# Altium schematic symbol library Clema_RES.SchLib: 15 symbols
Pins are listed as number, name and electrical type; pins without a type are passive.

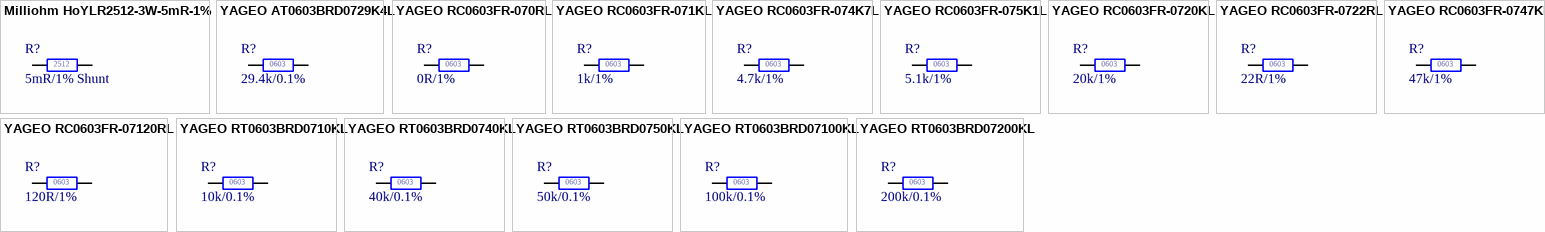
[diagram p0: symbols Milliohm HoYLR2512-3W-5mR-1% to YAGEO RT0603BRD07200KL]

## Milliohm HoYLR2512-3W-5mR-1%
designator R?, comment 5mR/1% Shunt
RES 5mΩ ±1% 3W 2512; Manufacturer: Milliohm; Manufacturer Part Number: HoYLR2512-3W-5mR-1%; DigiKey Part Number: 5705-HoYLR2512-3W-5mR-1%TR-ND; LCSC Part Number: C5375461; Package: 2512; Type: SMD
footprint RES_2512
pins: 1, 2

## YAGEO AT0603BRD0729K4L
designator R?, comment 29.4k/0.1%
RES 29.4kΩ ±0.1% 100mW 0603; Manufacturer: YAGEO; Manufacturer Part Number: AT0603BRD0729K4L; LCSC Part Number: C855768; Mouser Part Number: 603-AT0603BRD0729K4L; Package: 0603; Type: SMD
footprint RES_0603
pins: 1, 2

## YAGEO RC0603FR-070RL
designator R?, comment 0R/1%
RES 0Ω ±1% 100mW 0603; Manufacturer: YAGEO; Manufacturer Part Number: RC0603FR-070RL; DigiKey Part Number: 311-0.0HRTR-ND; LCSC Part Number: C100044; Mouser Part Number: 603-RC0603FR-070RL; Package: 0603; Type: SMD
footprint RES_0603
pins: 1, 2

## YAGEO RC0603FR-071KL
designator R?, comment 1k/1%
RES 1kΩ ±1% 100mW 0603; Manufacturer: YAGEO; Manufacturer Part Number: RC0603FR-071KL; DigiKey Part Number: 311-1.00KHRTR-ND; LCSC Part Number: C22548; Mouser Part Number: 603-RC0603FR-071KL; Package: 0603; Type: SMD
footprint RES_0603
pins: 1, 2

## YAGEO RC0603FR-074K7L
designator R?, comment 4.7k/1%
RES 4.7kΩ ±1% 100mW 0603; Manufacturer: YAGEO; Manufacturer Part Number: RC0603FR-074K7L; DigiKey Part Number: 311-4.70KHRTR-ND; LCSC Part Number: C99782; Mouser Part Number: 603-RC0603FR-074K7L; Package: 0603; Type: SMD
footprint RES_0603
pins: 1, 2

## YAGEO RC0603FR-075K1L
designator R?, comment 5.1k/1%
RES 5.1kΩ ±1% 100mW 0603; Manufacturer: YAGEO; Manufacturer Part Number: RC0603FR-075K1L; DigiKey Part Number: 311-5.10KHRTR-ND; LCSC Part Number: C105580; Mouser Part Number: 603-RC0603FR-075K1L; Package: 0603; Type: SMD
footprint RES_0603
pins: 1, 2

## YAGEO RC0603FR-0720KL
designator R?, comment 20k/1%
RES 20kΩ ±1% 100mW 0603; Manufacturer: YAGEO; Manufacturer Part Number: RC0603FR-0720KL; DigiKey Part Number: 311-20.0KHRTR-ND; LCSC Part Number: C105575; Mouser Part Number: 603-RC0603FR-0720KL; Package: 0603; Type: SMD
footprint RES_0603
pins: 1, 2

## YAGEO RC0603FR-0722RL
designator R?, comment 22R/1%
RES 22Ω ±1% 100mW 0603; Manufacturer: YAGEO; Manufacturer Part Number: RC0603FR-0722RL; LCSC Part Number: C107701; Mouser Part Number: 603-RC0603FR-0722RL; Package: 0603; Type: SMD
footprint RES_0603
pins: 1, 2

## YAGEO RC0603FR-0747KL
designator R?, comment 47k/1%
RES 47kΩ ±1% 100mW 0603; Manufacturer: YAGEO; Manufacturer Part Number: RC0603FR-0747KL; DigiKey Part Number: 311-47.0KHRTR-ND; LCSC Part Number: C105579; Mouser Part Number: 603-RC0603FR-0747KL; Package: 0603; Type: SMD
footprint RES_0603
pins: 1, 2

## YAGEO RC0603FR-07120RL
designator R?, comment 120R/1%
RES 120Ω ±1% 100mW 0603; Manufacturer: YAGEO; Manufacturer Part Number: RC0603FR-07120RL; LCSC Part Number: C114640; Mouser Part Number: 603-RC0603FR-07120RL; Package: 0603; Type: SMD
footprint RES_0603
pins: 1, 2

## YAGEO RT0603BRD0710KL
designator R?, comment 10k/0.1%
RES 10kΩ ±0.1% 100mW 0603; Manufacturer: YAGEO; Manufacturer Part Number: RT0603BRD0710KL; LCSC Part Number: C95204; Package: 0603; Type: SMD
footprint RES_0603
pins: 1, 2

## YAGEO RT0603BRD0740KL
designator R?, comment 40k/0.1%
RES 40kΩ ±0.1% 100mW 0603; Manufacturer: YAGEO; Manufacturer Part Number: RT0603BRD0740KL; DigiKey Part Number: 13-RT0603BRD0740KLTR-ND; LCSC Part Number: C861392; Package: 0603; Type: SMD
footprint RES_0603
pins: 1, 2

## YAGEO RT0603BRD0750KL
designator R?, comment 50k/0.1%
RES 50kΩ ±0.1% 100mW 0603; Manufacturer: YAGEO; Manufacturer Part Number: RT0603BRD0750KL; DigiKey Part Number: 13-RT0603BRD0750KLTR-ND; LCSC Part Number: C861451; Mouser Part Number: 603-RT0603BRD0750KL; Package: 0603; Type: SMD
footprint RES_0603
pins: 1, 2

## YAGEO RT0603BRD07100KL
designator R?, comment 100k/0.1%
RES 100kΩ ±0.1% 100mW 0603; Manufacturer: YAGEO; Manufacturer Part Number: RT0603BRD07100KL; DigiKey Part Number: YAG1235TR-ND; LCSC Part Number: C122538; Mouser Part Number: 603-RT0603BRD07100KL; Package: 0603; Type: SMD
footprint RES_0603
pins: 1, 2

## YAGEO RT0603BRD07200KL
designator R?, comment 200k/0.1%
RES 200kΩ ±0.1% 100mW 0603; Manufacturer: YAGEO; Manufacturer Part Number: RT0603BRD07200KL; LCSC Part Number: C728585; Package: 0603; Type: SMD
footprint RES_0603
pins: 1, 2